# Altium footprint library TitansLib.PcbLib: 333 footprints (part 16 of 21)
Each footprint in its own frame and in the unit in brackets; x right, y up, seen from the top. Pads: shape width x height; smd on the part's side, far side on the other; paste and mask are expansions set on the pad; w line width, h text height; cw(c..) or ccw(c..) is an arc to the next point about the centre after c.
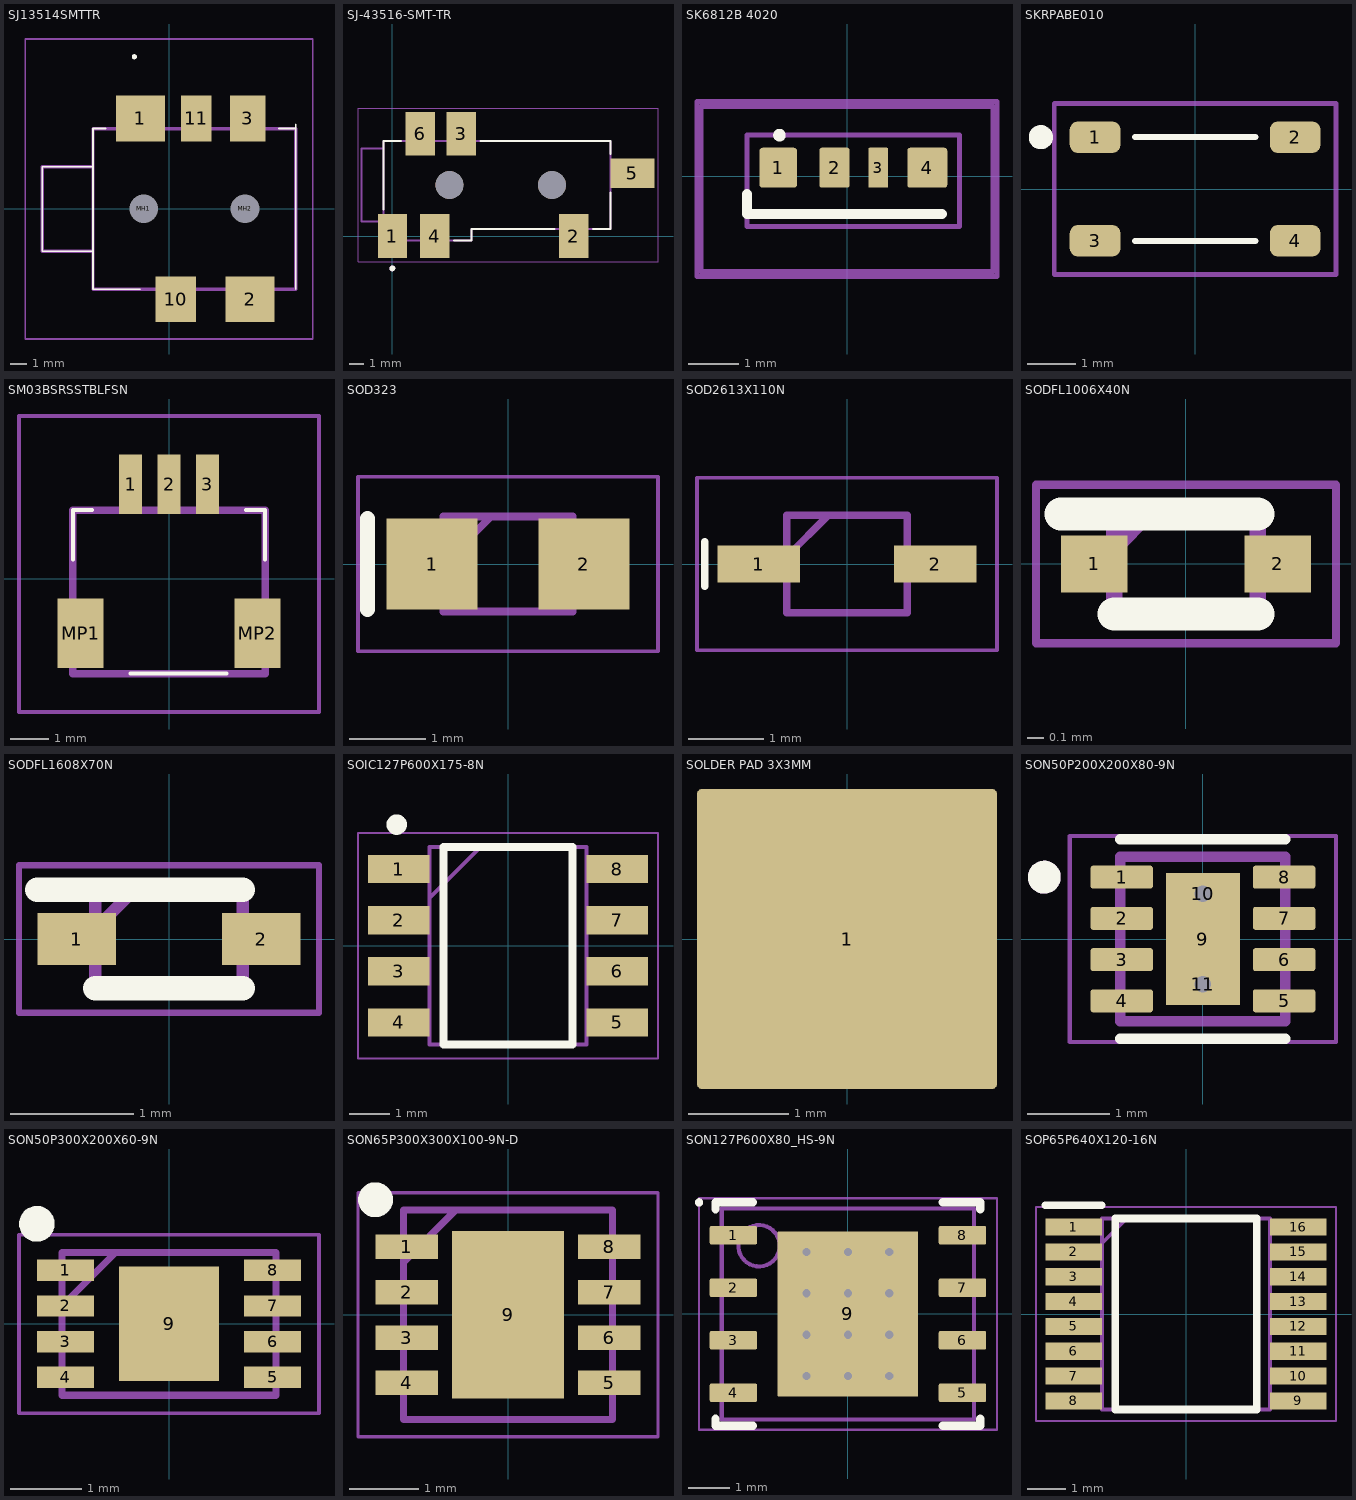
[diagram p15: the footprints below, top view; thin cyan lines are the x and y axes]

## SJ13514SMTTR [mm]
pads (7):
  rect 2.9x2.7 smd: 1(-1.7,5.35) 2(4.8,-5.35)
  rect 2.1x2.7 smd: 3(4.65,5.35)
  rect 2.4x2.7 smd: 10(0.4,-5.35)
  rect 1.8x2.7 smd: 11(1.6,5.35)
  round 0.85 hole 1.7 unplated: MH1(-1.5,0) MH2(4.5,0)
Top Overlay:
  lines w0.1: -4.5,-4.75 -1.7,-4.75 -4.5,-4.75 ; -4.5,-4.75 -4.5,-2.5 ; -4.5,-4.75 -4.5,-2.5 ; -4.5,-2.5 -7.5,-2.5 -7.5,2.5 -4.5,2.5 ; -4.5,-2.5 -4.5,2.5 ; -4.5,2.5 -4.5,4.75 ; -4.5,2.5 -4.5,4.75 ; -4.5,4.75 -3.75,4.75 -4.5,4.75 ; 6.5,4.75 7.5,4.75 6.5,4.75 ; 7.5,-4.75 7.5,5 7.5,-4.75
  lines w0.2: -2.1,9 ccw(c-2.05,9) -2,9 ; -2.1,9 cw(c-2.05,9) -2,9 ; -2.1,9 ccw(c-2.05,9) -2,9
Mechanical 13:
  lines w0.2: -7.5,-2.5 -7.5,2.5 -4.5,2.5 -4.5,-2.5 -7.5,-2.5 ; -4.5,-4.75 -4.5,4.75 7.5,4.75 7.5,-4.75 -4.5,-4.75
Mechanical 15:
  lines w0.1: -8.5,-7.7 -8.5,10.05 8.5,10.05 8.5,-7.7 -8.5,-7.7
3D body "SJ1-3514-SMT-TR.stp": height 5.11, standoff -0.49, extent -7.5,-5.99 7.5,6.01

## SJ-43516-SMT-TR [mm]
height 5.3
pads (8):
  rect 2x3 smd: 1(0,0) 2(12.4,0) 3(4.7,7) 4(2.9,0) 6(1.9,7)
  rect 3x2 smd: 5(16.4,4.3)
  round 1.9 hole 1.9 unplated: ""(3.9,3.5) ""(10.9,3.5)
Top Overlay:
  circle w0.2: c0,-2.2 r0.1
  lines w0.127: -0.6,1.82 -0.6,6.5 0.58,6.5 ; 4.22,-0.3 5.4,-0.3 5.4,0.5 11.08,0.5 ; 6.02,6.5 14.9,6.5 14.9,5.62 ; 13.72,0.5 14.9,0.5 14.9,2.98
Mechanical 13:
  circle w0.2: c0,-2.2 r0.1
  lines w0.127: -0.6,1 -0.6,6 ; -0.6,1 -0.6,-0.3 5.4,-0.3 5.4,0.5 14.9,0.5 14.9,6.5 -0.6,6.5 -0.6,6 ; -0.6,1 -2.1,1 -2.1,6 -0.6,6
Mechanical 15:
  lines w0.05: -2.35,-1.75 -2.35,8.75 18.15,8.75 18.15,-1.75 -2.35,-1.75
3D body "step_temp.STEP": height 5.06, standoff -0.94, extent -2.25,-1 17.25,8

## SK6812B 4020 [mm] "Adafruit Accessories NeoPixel Side-Light RGB LED w/ Integrated Driver Chip - 10-pack - SK6812B 4020"
pads (4):
  rrect15% 0.75x0.8 smd mask+0.05: 1(-1.375,0.175)
  rrect15% 0.6x0.8 smd mask+0.05: 2(-0.25,0.175)
  rrect15% 0.4x0.8 smd mask+0.05: 3(0.625,0.175)
  rrect15% 0.8x0.8 smd mask+0.05: 4(1.605,0.175)
Top Overlay:
  lines w0.15: -1.4,0.825 cw(c-1.35,0.825) -1.3,0.825 cw(c-1.35,0.825) -1.311,0.856
  lines w0.2: -2,-0.35 -2,-0.75 1.9,-0.75
Top Assembly:
  lines w0.1: -2.923,-1.904 2.923,-1.904 2.923,1.401 -2.923,1.401 -2.923,-1.904
  text ".Designator" at -1.275,-0.287 h1
Mechanical 15:
  lines w0.1: -2,0.825 2.25,0.825 2.25,-1 -2,-1 -2,0.828
Mechanical 20:
  lines w0.1: -3,-2 3,-2 3,1.5 -3,1.5 -3,-2
3D body "4691.stp": height 2.06, standoff 0.01, extent -2,-1 2,0.5

## SKRPABE010 [mm]
pads (4):
  rrect50% 1.05x0.65 smd: 1(-2.075,1.075) 2(2.075,1.075) 3(-2.075,-1.075) 4(2.075,-1.075)
Top Overlay:
  circle w0.3: c-3.2,1.075 r0.1
  lines w0.127: -1.25,1.075 1.25,1.075 ; -1.246,-1.082 1.254,-1.082
Top Courtyard:
  lines w0.1: -2.923,-1.773 2.923,-1.773 2.923,1.773 -2.923,1.773 -2.923,-1.773
3D body "SKRPAB.STEP": height 2.44, standoff -0.06, extent -2.3,-1.6 2.3,1.6

## SM03BSRSSTBLFSN [mm]
pads (5):
  rect 0.6x1.55 smd: 1(-1,2.463) 2(0,2.463) 3(1,2.463)
  rect 1.2x1.8 smd: MP1(-2.3,-1.413) MP2(2.3,-1.413)
Top Overlay:
  lines w0.1: -2.5,0.5 -2.5,1.787 -2,1.787 ; -1,-2.463 1.5,-2.463 ; 2,1.787 2.5,1.787 2.5,0.5
Mechanical 13:
  lines w0.2: -2.5,-2.463 -2.5,1.787 2.5,1.787 2.5,-2.463 -2.5,-2.463
Mechanical 15:
  lines w0.1: -3.9,-3.463 -3.9,4.237 3.9,4.237 3.9,-3.463 -3.9,-3.463
3D body "SM03B-SRSS-TB_LF__SN_.stp": height 2.96, standoff 0, extent -2.5,-2.085 2.5,2.865

## SOD323 [mm]
pads (2):
  rect 1.2x1.2 smd: 1(-1,0) 2(1,0)
Top Overlay:
  lines w0.2: -1.85,-0.6 -1.85,0.6
Mechanical 13:
  lines w0.1: -0.85,0 -0.225,0.625 ; -0.85,-0.625 -0.85,0.625 0.85,0.625 0.85,-0.625 -0.85,-0.625
Mechanical 15:
  lines w0.05: -1.975,-1.15 -1.975,1.15 1.975,1.15 1.975,-1.15 -1.975,-1.15
3D body "B0530WSHE3-TP.stp": height 1.04, standoff -0.01, extent -1.248,-0.625 1.252,0.625

## SOD2613X110N [mm]
pads (2):
  rect 1.1x0.5 smd: 1(-1.175,0) 2(1.175,0)
Top Overlay:
  lines w0.1: -1.9,-0.3 -1.9,0.3
Mechanical 13:
  lines w0.1: -0.8,0.1 -0.25,0.65 ; -0.8,-0.65 0.8,-0.65 0.8,0.65 -0.8,0.65 -0.8,-0.65
Mechanical 15:
  lines w0.05: -2,-1.15 2,-1.15 2,1.15 -2,1.15 -2,-1.15
3D body "1N5817WS.stp": height 1.1, standoff 0, extent -1.325,-0.65 1.325,0.65

## SODFL1006X40N [mm]
pads (2):
  rect 0.4x0.34 smd: 1(-0.55,0) 2(0.55,0)
Top Overlay:
  lines w0.2: -0.75,0.3 0.43,0.3 ; -0.43,-0.3 0.43,-0.3
Mechanical 13:
  lines w0.1: -0.43,0.1 -0.23,0.3 ; -0.43,-0.3 0.43,-0.3 0.43,0.3 -0.43,0.3 -0.43,-0.3
Mechanical 15:
  lines w0.05: -0.9,-0.475 0.9,-0.475 0.9,0.475 -0.9,0.475 -0.9,-0.475
3D body "CDZVT2R3.6B.stp": height 0.4, standoff 0, extent -0.5,-0.3 0.5,0.3

## SODFL1608X70N [mm]
pads (2):
  rect 0.64x0.42 smd: 1(-0.75,0) 2(0.75,0)
Top Overlay:
  lines w0.2: -1.07,0.4 0.6,0.4 ; -0.6,-0.4 0.6,-0.4
Mechanical 13:
  lines w0.1: -0.6,0.08 -0.28,0.4 ; -0.6,-0.4 -0.6,0.4 0.6,0.4 0.6,-0.4 -0.6,-0.4
Mechanical 15:
  lines w0.05: -1.22,-0.6 -1.22,0.6 1.22,0.6 1.22,-0.6 -1.22,-0.6
3D body "BAT54XV2T1G.stp": height 0.7, standoff 0, extent -0.8,-0.4 0.8,0.4

## SOIC127P600X175-8N [mm]
pads (8):
  rect 1.525x0.7 smd: 1(-2.712,1.905) 2(-2.712,0.635) 3(-2.712,-0.635) 4(-2.712,-1.905) 5(2.712,-1.905) 6(2.712,-0.635) 7(2.712,0.635) 8(2.712,1.905)
Top Overlay:
  circle w0.254: c-2.764,3.007 r0.127
  lines w0.2: -1.6,-2.45 1.6,-2.45 1.6,2.45 -1.6,2.45 -1.6,-2.45
Mechanical 15:
  lines w0.1: -1.95,1.18 -0.68,2.45 ; -1.95,-2.45 1.95,-2.45 1.95,2.45 -1.95,2.45 -1.95,-2.45
Mechanical 20:
  lines w0.05: -3.725,-2.8 3.725,-2.8 3.725,2.8 -3.725,2.8 -3.725,-2.8
3D body "NS4150C.stp": height 1.75, standoff 0, extent -3,-2.444 3,2.456

## SOLDER PAD 3X3MM [mm] "Soldering Pad of 3X3mm."
pads (1):
  rrect3% 3x3 smd mask+0.075: 1(0,0)

## SON50P200X200X80-9N [mm]
height 0.8
pads (11):
  rrect25% 0.76x0.28 smd: 1(-0.985,0.75) 2(-0.985,0.25) 3(-0.985,-0.25) 4(-0.985,-0.75) 5(0.985,-0.75) 6(0.985,-0.25) 7(0.985,0.25) 8(0.985,0.75)
  rect 0.9x1.6 smd paste-2: 9(0,0)
  round 0.4 hole 0.2 mask+0: 10(0,0.55) 11(0,-0.55)
Top Overlay:
  circle w0.2: c-1.925,0.75 r0.1
  lines w0.127: -1,-1.21 1,-1.21 ; -1,1.21 1,1.21
Top Paste:
  region: 0.284,-0.506 -0.284,-0.506 -0.284,0.506 0.284,0.506
Mechanical 13:
  circle w0.2: c-1.925,0.75 r0.1
  lines w0.127: -1,-1 1,-1 1,1 -1,1 -1,-1
Mechanical 15:
  lines w0.05: -1.615,-1.25 1.615,-1.25 1.615,1.25 -1.615,1.25 -1.615,-1.25
3D body "step_temp.STEP": height 0.75, standoff -0.05, extent -1,-1 1,1

## SON50P300X200X60-9N [mm]
pads (9):
  rect 0.8x0.3 smd: 1(-1.45,0.75) 2(-1.45,0.25) 3(-1.45,-0.25) 4(-1.45,-0.75) 5(1.45,-0.75) 6(1.45,-0.25) 7(1.45,0.25) 8(1.45,0.75)
  rect 1.4x1.6 smd: 9(0,0)
Top Overlay:
  circle w0.25: c-1.85,1.4 r0.125
Mechanical 13:
  lines w0.1: -1.5,0.25 -0.75,1 ; -1.5,-1 1.5,-1 1.5,1 -1.5,1 -1.5,-1
Mechanical 15:
  lines w0.05: -2.1,-1.25 2.1,-1.25 2.1,1.25 -2.1,1.25 -2.1,-1.25
3D body "ATECC608C-MAVDA-S.stp": height 0.6, standoff 0, extent -1.55,-1 1.55,1

## SON65P300X300X100-9N-D [mm]
pads (9):
  rect 0.9x0.35 smd: 1(-1.45,0.975) 2(-1.45,0.325) 3(-1.45,-0.325) 4(-1.45,-0.975) 5(1.45,-0.975) 6(1.45,-0.325) 7(1.45,0.325) 8(1.45,0.975)
  rect 1.6x2.4 smd: 9(0,0)
Top Overlay:
  circle w0.25: c-1.9,1.65 r0.125
Mechanical 13:
  lines w0.1: -1.5,0.75 -0.75,1.5 ; -1.5,-1.5 1.5,-1.5 1.5,1.5 -1.5,1.5 -1.5,-1.5
Mechanical 15:
  lines w0.05: -2.15,-1.75 2.15,-1.75 2.15,1.75 -2.15,1.75 -2.15,-1.75
3D body "MCP4561T-502E_MF.stp": height 1, standoff 0, extent -1.55,-1.5 1.55,1.5

## SON127P600X80_HS-9N [mm] "SON, 8-Leads, Body 5.00x6.00mm, Pitch 1.27mm, Thermal Pad 4.00x3.40mm, IPC Medium Density"
height 0.8
pads (9):
  rrect22% 1.15x0.45 smd: 1(-2.77,1.905) 2(-2.77,0.635) 3(-2.77,-0.635) 4(-2.77,-1.905) 5(2.77,-1.905) 6(2.77,-0.635) 7(2.77,0.635) 8(2.77,1.905)
  rrect2% 3.4x4 smd paste-1.7: 9(0,0)
via 1,-1.5 diameter 0.5 hole 0.2
via 0,-1.5 diameter 0.5 hole 0.2
via -1,-1.5 diameter 0.5 hole 0.2
via 1,-0.5 diameter 0.5 hole 0.2
via 0,-0.5 diameter 0.5 hole 0.2
via -1,-0.5 diameter 0.5 hole 0.2
via 1,0.5 diameter 0.5 hole 0.2
via 0,0.5 diameter 0.5 hole 0.2
via -1,0.5 diameter 0.5 hole 0.2
via 1,1.5 diameter 0.5 hole 0.2
via 0,1.5 diameter 0.5 hole 0.2
via -1,1.5 diameter 0.5 hole 0.2
Top Overlay:
  circle w0.1: c-3.6,2.7 r0.05
  lines w0.2: -3.2,-2.53 -3.2,-2.7 -2.295,-2.7 ; -3.2,2.53 -3.2,2.7 -2.295,2.7 ; 2.295,-2.7 3.2,-2.7 3.2,-2.53 ; 2.295,2.7 3.2,2.7 3.2,2.53
Top Paste:
  rectangle: 0.665,-1.895 1.595,-0.765
  rectangle: 0.665,-0.565 1.595,0.565
  rectangle: 0.665,0.765 1.595,1.895
  rectangle: -0.465,-1.895 0.465,-0.765
  rectangle: -0.465,-0.565 0.465,0.565
  rectangle: -0.465,0.765 0.465,1.895
  rectangle: -1.595,-1.895 -0.665,-0.765
  rectangle: -1.595,-0.565 -0.665,0.565
  rectangle: -1.595,0.765 -0.665,1.895
Mechanical 13:
  circle w0.1: c-2.15,1.65 r0.5
  lines w0.1: -3.05,-2.55 3.05,-2.55 3.05,2.55 -3.05,2.55 -3.05,-2.55
Mechanical 15:
  lines w0.05: -3.605,-2.8 3.605,-2.8 3.605,2.8 -3.605,2.8 -3.605,-2.8
  lines w0.1: -0.5,0 0.5,0 ; 0,-0.5 0,0.5
3D body "SON127P600X80_HS-9N.step": height 0.8, standoff 0, extent -3.1,-2.55 3.1,2.55

## SOP65P640X120-16N [mm]
pads (16):
  rect 1.475x0.45 smd: 1(-2.938,2.275) 2(-2.938,1.625) 3(-2.938,0.975) 4(-2.938,0.325) 5(-2.938,-0.325) 6(-2.938,-0.975) 7(-2.938,-1.625) 8(-2.938,-2.275) 9(2.938,-2.275) 10(2.938,-1.625) 11(2.938,-0.975) 12(2.938,-0.325) 13(2.938,0.325) 14(2.938,0.975) 15(2.938,1.625) 16(2.938,2.275)
Top Overlay:
  lines w0.2: -3.675,2.85 -2.2,2.85 ; -1.85,-2.5 -1.85,2.5 1.85,2.5 1.85,-2.5 -1.85,-2.5
Mechanical 13:
  lines w0.1: -2.2,1.85 -1.55,2.5 ; -2.2,-2.5 -2.2,2.5 2.2,2.5 2.2,-2.5 -2.2,-2.5
Mechanical 15:
  lines w0.05: -3.925,-2.8 -3.925,2.8 3.925,2.8 3.925,-2.8 -3.925,-2.8
3D body "TMUX1574PWR.stp": height 1.13, standoff 0, extent -3.2,-2.5 3.2,2.5